# Altium integrated library SH_Sound_Board.IntLib: 8 symbols
Pins are listed as number, name and electrical type; pins without a type are passive.

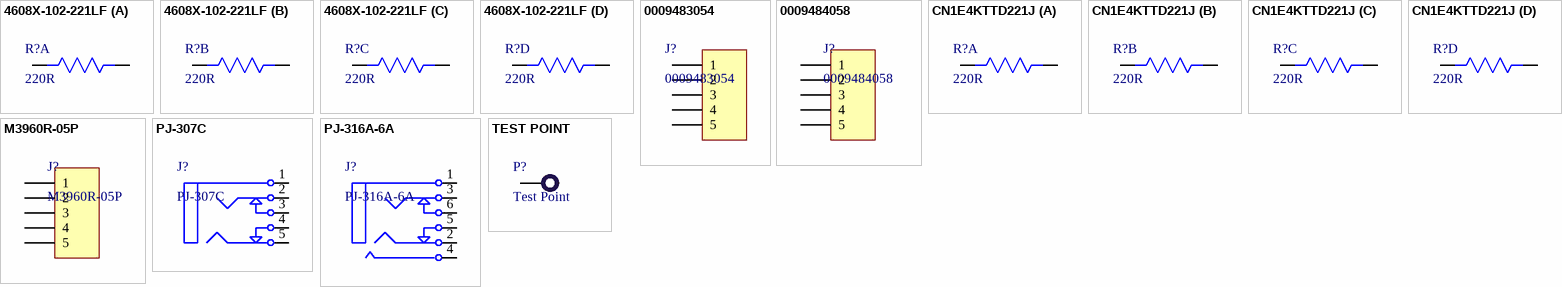
[diagram p0: symbols 4608X-102-221LF to TEST POINT]

## 4608X-102-221LF
designator R?, comment 220R
RES ARRAY 4 RES 220 OHM 8SIP; Manufacturer: Bourns; Manufacturer Part Number: 4608X-102-221LF; Number of Terminals/Pins: 8; Power Rating: 1W; Number of Resistors: 4; Temperature Coefficient: 100ppm/°C; Tolerance: 2%; Voltage Rating: 100V; Circuit Type: Isolated; Power Per Element: 300mW; Insulation Resistance: 10GR; Lead Length: 3.43mm; Supplier 1: RSComponents; RoHS: Yes; Category: Resistor Arrays; Stock 1: 1; Pricing 1: 25=0.31900, 625=0.15300, 1250=0.13900, 2500=0.13200 (USD); Mount: Through Hole; Case/Package: SIP; Number of Pins: 8; Material: Resin,Epoxy; Min Operating Temperature: -55°C; Max Operating Temperature: 125°C; Resistance: 220R; Number of Elements: 4; Voltage Rating (DC): 100V; Packaging: Bulk; Package Quantity: 200; Termination: Pin; Number of Contacts: 8; Series: 4600X; Technology: THICK FILM; Resistance Tolerance: 2%; Length: 20.27mm; Width: 0.098inch; Height: 0.2inch; Terminal Pitch: 2.54mm; Depth: 2.49mm; Thickness: 0.096inch; Radiation Hardening: No; REACH SVHC: No SVHC; Military Standard: Not; Lead Free: Lead Free; RoHS Compliant: Yes; ComponentLink1URL: https://datasheet.ciiva.com/14179/ee4609x-14179600.pdf?src-supplier=Distrelec; ComponentLink1Description: https://datasheet.ciiva.com/14179/ee4609x-14179600.pdf?src-supplier=Distrelec; ComponentLink2URL: https://datasheet.ciiva.com/11807/0900766b8069ccfd-11807176.pdf?src-supplier=RSComponents; ComponentLink2Description: https://datasheet.ciiva.com/11807/0900766b8069ccfd-11807176.pdf?src-supplier=RSComponents; ComponentLink3URL: https://datasheet.ciiva.com/3263/4600x-3263657.pdf?src-supplier=Avnet; ComponentLink3Description: https://datasheet.ciiva.com/3263/4600x-3263657.pdf?src-supplier=Avnet; ComponentLink4URL: https://datasheet.ciiva.com/15158/getdatasheetpartid-201762-15158038.pdf?src-supplier=Verical; ComponentLink4Description: https://datasheet.ciiva.com/15158/getdatasheetpartid-201762-15158038.pdf?src-supplier=Verical; ComponentLink5URL: https://datasheet.ciiva.com/16827/4600x-16827721.pdf?src-supplier=Avnet+Europe; ComponentLink5Description: https://datasheet.ciiva.com/16827/4600x-16827721.pdf?src-supplier=Avnet+Europe; ComponentLink6URL: https://datasheet.ciiva.com/2690/4600x-2690298.pdf?src-supplier=Digi-Key; ComponentLink6Description: https://datasheet.ciiva.com/2690/4600x-2690298.pdf?src-supplier=Digi-Key; ComponentLink7URL: https://datasheet.ciiva.com/30208/4600x-30208038.pdf?src-supplier=Onlinecomponents.com; ComponentLink7Description: https://datasheet.ciiva.com/30208/4600x-30208038.pdf?src-supplier=Onlinecomponents.com; ComponentLink8URL: https://datasheet.ciiva.com/14583/70154307-14583677.pdf?src-supplier=Allied+Electronics; ComponentLink8Description: https://datasheet.ciiva.com/14583/70154307-14583677.pdf?src-supplier=Allied+Electronics; ComponentLink9URL: https://datasheet.ciiva.com/1133/682196-1133120.pdf?src-supplier=Element14; ComponentLink9Description: https://datasheet.ciiva.com/1133/682196-1133120.pdf?src-supplier=Element14; Supplier Part Number 1: 5223882
footprint 4608X-102-221LF
part A pins: 1, 2
part B pins: 3, 4
part C pins: 5, 6
part D pins: 7, 8

## 0009483054
designator J?
CONN RCPT 5POS 0.156 GOLD PCB; Manufacturer: Molex; Supplier 1: Avnet; Manufacturer Part Number: 0009483054; RoHS: Yes; Category: Headers and Wire Housings; Stock 1: 1911; Pricing 1: 1=0.78000, 10=0.75920, 30=0.73840, 50=0.71760, 100=0.69680, 250=0.67600, 500=0.65520 (USD); ComponentLink1URL: http://components.arrow.com/part/dataview/42845043S9959775N3303?src-supplier=Arrow+Electronics; ComponentLink1Description: http://components.arrow.com/part/dataview/42845043S9959775N3303?src-supplier=Arrow+Electronics; Supplier Part Number 1: 09-48-3054
footprint 0009483054
pins: 1, 2, 3, 4, 5

## 0009484058
designator J?
CONN RCPT 5POS 0.156 TIN PCB; Manufacturer: Molex; Supplier 1: Newark; Manufacturer Part Number: 09-48-4058; RoHS: Yes; Category: Headers and Wire Housings; Stock 1: 536; Pricing 1: 1=1.40000, 10=1.14000, 25=1.08000, 50=1.02000, 100=0.95900, 250=0.91000 (USD); ComponentLink1URL: https://datasheet.ciiva.com/5152/0009484058-pcb-receptacles-156345-5152334.pdf?src-supplier=Mouser; ComponentLink1Description: https://datasheet.ciiva.com/5152/0009484058-pcb-receptacles-156345-5152334.pdf?src-supplier=Mouser; ComponentLink2URL: https://datasheet.ciiva.com/30162/135130009484058-pcb-receptacles-30162639.pdf?src-supplier=Onlinecomponents.com; ComponentLink2Description: https://datasheet.ciiva.com/30162/135130009484058-pcb-receptacles-30162639.pdf?src-supplier=Onlinecomponents.com; ComponentLink3URL: https://datasheet.ciiva.com/3935/54480009484058-pcb-receptacles-3935610.pdf?src-supplier=Arrow+Electronics; ComponentLink3Description: https://datasheet.ciiva.com/3935/54480009484058-pcb-receptacles-3935610.pdf?src-supplier=Arrow+Electronics; ComponentLink4URL: https://datasheet.ciiva.com/23692/ps-08-50-23692432.pdf?src-supplier=Newark; ComponentLink4Description: https://datasheet.ciiva.com/23692/ps-08-50-23692432.pdf?src-supplier=Newark; Supplier Part Number 1: 99AC9867
footprint 0009484058
pins: 1, 2, 3, 4, 5

## CN1E4KTTD221J
designator R?, comment 220R
4 ±5% 8 220Ω 63mW ±200ppm/℃ SMD,2x1mm Resistor Networks & Arrays ROHS; Manufacturer: KOA Speer; Manufacturer Part No: CN1E4KTTD221J; ComponentLink1Description: LCSC; ComponentLink1URL: https://www.lcsc.com/product-detail/Resistor-Networks-Arrays_KOA-Speer-Elec-CN1E4KTTD221J_C276099.html; Package: Custom
footprint CN1E4KTTD221J
part A pins: 1, 8
part B pins: 2, 7
part C pins: 3, 6
part D pins: 4, 5

## M3960R-05P
designator J?
1x5P 1 3.96mm Male pin 5 Shrouded Plugin,P=3.96mm Wire To Board / Wire To Wire Connector ROHS; Manufacturer: XFCN; Manufacturer Part No: M3960R-05P; ComponentLink1Description: LCSC; ComponentLink1URL: https://www.lcsc.com/product-detail/Wire-To-Board-Wire-To-Wire-Connector_XFCN-M3960R-05P_C492523.html
footprint M3960R-05P
pins: 1, 2, 3, 4, 5

## PJ-307C
designator J?
3.5mm headphone jack 30V 500mA Plugin Audio Connectors ROHS; Manufacturer: BOOMELE; Manufacturer Part No: PJ-307C; Package: Custom; ComponentLink1Description: LCSC; ComponentLink1URL: https://www.lcsc.com/product-detail/span-style-background-color-ff0-Audio-span-Connectors_BOOMELE-Boom-Precision-Elec-PJ-307C_C16684.html
footprint PJ-307C
pins: 1, 2, 3, 4, 5

## PJ-316A-6A
designator J?
3.5mm headphone jack 30V 500mA SMD Audio Connectors ROHS; Manufacturer: Korean Hroparts; ComponentLink1Description: LCSC; ComponentLink1URL: https://www.lcsc.com/product-detail/Audio-Connectors_Korean-Hroparts-Elec-PJ-316A-6A_C128987.html; Manufacturer Part No: PJ-316A-6A; Package: Custom
footprint PJ-316A-6A
pins: 1, 2, 3, 4, 5, 6

## TEST POINT
designator P?, comment Test Point
Test Point ON
footprint TEST POINT
pins: 1